# Altium footprint library Ethernet Modbus Dev PCB.PcbLib: 34 footprints (part 1 of 3)
Each footprint in its own frame and in the unit in brackets; x right, y up, seen from the top. Pads: shape width x height; smd on the part's side, far side on the other; paste and mask are expansions set on the pad; w line width, h text height; cw(c..) or ccw(c..) is an arc to the next point about the centre after c.
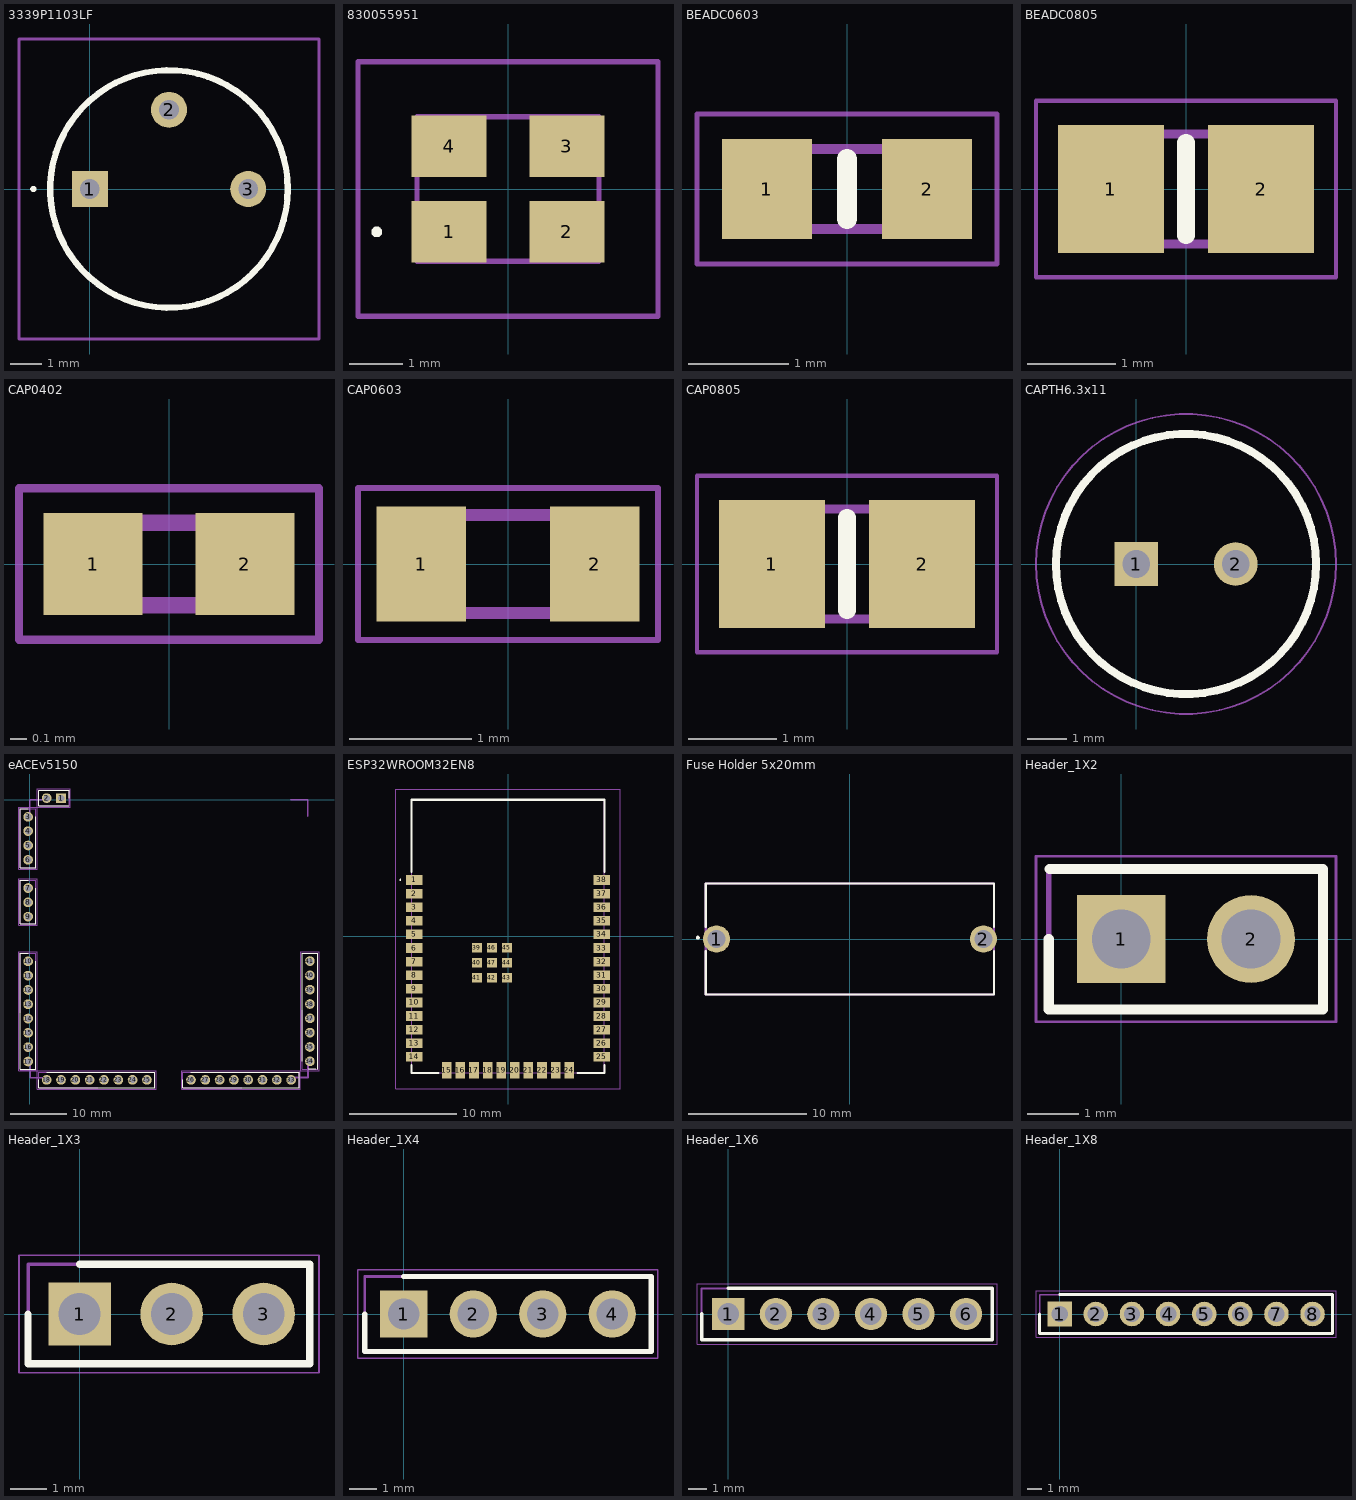
[diagram p0: the footprints below, top view; thin cyan lines are the x and y axes]

## 3339P1103LF [mm]
pads (3):
  rect 1.155x1.155 hole 0.63: 1(0,0)
  round 1.155 hole 0.63: 2(2.54,2.54) 3(5.08,0)
Top Overlay:
  circle w0.2: c2.54,0 r3.81
  lines w0.1: -1.86,0 ccw(c-1.81,0) -1.76,0 ccw(c-1.81,0) -1.86,0
Mechanical 13:
  circle w0.1: c2.54,0 r3.81
Mechanical 15:
  lines w0.1: -2.27,-4.81 7.35,-4.81 7.35,4.81 -2.27,4.81 -2.27,-4.81
3D body "3339P-1-103LF.stp": height 6.42, standoff -4.69, extent -1.27,-3.81 6.35,3.81

## 830055951 [mm]
pads (4):
  rect 1.4x1.15 smd: 1(-1.1,-0.8) 2(1.1,-0.8) 3(1.1,0.8) 4(-1.1,0.8)
Top Overlay:
  lines w0.1: -2.5,-0.8 ccw(c-2.45,-0.8) -2.4,-0.8 ccw(c-2.45,-0.8) -2.5,-0.8
Mechanical 13:
  lines w0.1: -1.7,-1.35 -1.7,1.35 1.7,1.35 1.7,-1.35 -1.7,-1.35
Mechanical 15:
  lines w0.1: -2.8,-2.375 -2.8,2.375 2.8,2.375 2.8,-2.375 -2.8,-2.375
3D body "830055951.stp": height 0.9, standoff 0, extent -1.7,-1.35 1.7,1.35

## BEADC0603 [mm]
pads (2):
  rect 0.9x1 smd: 1(-0.8,0) 2(0.8,0)
Top Overlay:
  lines w0.2: 0,-0.3 0,0.3
Mechanical 13:
  lines w0.1: -0.8,-0.4 -0.8,0.4 0.8,0.4 0.8,-0.4 -0.8,-0.4
Mechanical 15:
  lines w0.05: -1.5,-0.75 -1.5,0.75 1.5,0.75 1.5,-0.75 -1.5,-0.75
3D body "MMZ1608Y152BTD25.stp": height 0.95, standoff 0, extent -0.8,-0.4 0.8,0.4

## BEADC0805 [mm]
pads (2):
  rect 1.2x1.45 smd: 1(-0.85,0) 2(0.85,0)
Top Overlay:
  lines w0.2: 0,-0.525 0,0.525
Mechanical 13:
  lines w0.1: -1,-0.625 -1,0.625 1,0.625 1,-0.625 -1,-0.625
Mechanical 15:
  lines w0.05: -1.7,-1 -1.7,1 1.7,1 1.7,-1 -1.7,-1
3D body "ILHB0805ER601V.stp": height 1.1, standoff 0, extent -1,-0.625 1,0.625

## CAP0402 [mm]
pads (2):
  rect 0.6x0.62 smd: 1(-0.46,0) 2(0.46,0)
Mechanical 13:
  lines w0.1: -0.5,-0.25 -0.5,0.25 0.5,0.25 0.5,-0.25 -0.5,-0.25
Mechanical 15:
  lines w0.05: -0.91,-0.46 -0.91,0.46 0.91,0.46 0.91,-0.46 -0.91,-0.46
3D body "GRM1555C1H151JA01D.stp": height 0.55, standoff 0, extent -0.5,-0.25 0.5,0.25

## CAP0603 [mm]
pads (2):
  rect 0.73x0.94 smd: 1(-0.71,0) 2(0.71,0)
Mechanical 13:
  lines w0.1: -0.8,-0.4 -0.8,0.4 0.8,0.4 0.8,-0.4 -0.8,-0.4
Mechanical 15:
  lines w0.05: -1.225,-0.62 -1.225,0.62 1.225,0.62 1.225,-0.62 -1.225,-0.62
3D body "CL10B104KB8NNWC.stp": height 0.9, standoff 0, extent -0.8,-0.4 0.8,0.4

## CAP0805 [mm]
pads (2):
  rect 1.2x1.45 smd: 1(-0.85,0) 2(0.85,0)
Top Overlay:
  lines w0.2: 0,-0.525 0,0.525
Mechanical 13:
  lines w0.1: -1,-0.625 1,-0.625 1,0.625 -1,0.625 -1,-0.625
Mechanical 15:
  lines w0.05: -1.7,-1 1.7,-1 1.7,1 -1.7,1 -1.7,-1
3D body "HZ0805D102R-10.stp": height 1.1, standoff 0, extent -1,-0.625 1,0.625

## CAPTH6.3x11 [mm]
pads (2):
  rect 1.1x1.1 hole 0.7: 1(0,0)
  round 1.1 hole 0.7: 2(2.5,0)
Top Overlay:
  circle w0.2: c1.25,0 r3.275
Mechanical 13:
  circle w0.1: c1.25,0 r3.275
Mechanical 15:
  circle w0.05: c1.25,0 r3.775
3D body "450PK1MEFC6.3X11.stp": height 13, standoff -10, extent -2.138,-3.397 4.65,3.397

## eACEv5150 [mm]
pads (41):
  rect 1.725x1.725 hole 1.15: 1(5.54,0.3)
  round 1.725 hole 1.15: 2(3,0.3) 3(-0.3,-3.02) 4(-0.3,-5.56) 5(-0.3,-8.1) 6(-0.3,-10.64) 7(-0.3,-15.66) 8(-0.3,-18.2) 9(-0.3,-20.74) 10(-0.3,-28.66) 11(-0.3,-31.2) 12(-0.3,-33.74) 13(-0.3,-36.28) 14(-0.3,-38.82) 15(-0.3,-41.36) 16(-0.3,-43.9) 17(-0.3,-46.44) 18(3,-49.7) 19(5.54,-49.7) 20(8.08,-49.7) 21(10.62,-49.7) 22(13.16,-49.7) 23(15.7,-49.7) 24(18.24,-49.7) 25(20.78,-49.7) 26(28.6,-49.7) 27(31.14,-49.7) 28(33.68,-49.7) 29(36.22,-49.7) 30(38.76,-49.7) 31(41.3,-49.7) 32(43.84,-49.7) 33(46.38,-49.7) 34(49.7,-46.4) 35(49.7,-43.86) 36(49.7,-41.32) 37(49.7,-38.78) 38(49.7,-36.24) 39(49.7,-33.7) 40(49.7,-31.16) 41(49.7,-28.62)
Top Overlay:
  lines w0.2: -0.3,-27.24 -1.67,-27.24 -1.67,-47.837 1.07,-47.837 1.07,-28.66 ; -0.3,-14.24 -1.67,-14.24 -1.67,-22.01 1.07,-22.01 1.07,-15.66 ; -0.3,-1.6 -1.67,-1.6 -1.67,-12.06 1.07,-12.06 1.07,-3.02 ; 1.58,-49.7 1.58,-51.07 22.177,-51.07 22.177,-48.33 3,-48.33 ; 1.59,1.65 1.59,-1.07 6.94,-1.07 ; 1.59,1.68 6.96,1.68 ; 6.96,0.3 6.96,1.67 ; 27.18,-49.7 27.18,-51.07 47.777,-51.07 47.777,-48.33 28.6,-48.33 ; 48.33,-46.4 48.33,-27.223 51.07,-27.223 51.07,-47.82 ; 49.378,-47.75 50.748,-47.75
Mechanical 1:
  lines w0.3: 0,-2.972 0,-0.013 2.959,-0.013 ; 0.051,-46.38 0.051,-49.34 3.01,-49.34 ; 46.368,0.038 49.327,0.038 49.327,-2.921 ; 46.419,-49.289 49.378,-49.289 49.378,-46.33
Mechanical 13:
  lines w0.1: -1.67,-47.86 1.07,-47.86 ; -1.67,-37.7 -1.67,-27.24 1.07,-27.24 1.07,-37.7 ; 1.59,1.67 1.59,-1.07 6.96,-1.07 6.96,1.67 ; 12.04,-51.07 1.58,-51.07 1.58,-48.33 12.04,-48.33 ; 22.2,-51.07 22.2,-48.33 ; 37.64,-51.07 27.18,-51.07 27.18,-48.33 37.64,-48.33 ; 47.8,-51.07 47.8,-48.33 ; 48.33,-37.36 48.33,-47.82 51.07,-47.82 51.07,-37.36 ; 48.33,-27.2 51.07,-27.2 ; -1.67,-22.01 -1.67,-14.24 1.07,-14.24 1.07,-22.01 -1.67,-22.01 ; -1.67,-12.06 -1.67,-1.6 1.07,-1.6 1.07,-12.06 -1.67,-12.06
Mechanical 15:
  lines w0.05: 1.336,-1.32 1.336,1.92 ; 1.34,-1.32 7.21,-1.32 7.21,1.92 1.34,1.92 ; -1.92,-48.091 -1.92,-26.99 1.32,-26.99 1.32,-48.091 -1.92,-48.091 ; -1.92,-22.264 -1.92,-13.99 1.32,-13.99 1.32,-22.264 -1.92,-22.264 ; -1.92,-12.31 -1.92,-1.35 1.32,-1.35 1.32,-12.31 -1.92,-12.31 ; 1.33,-51.32 22.431,-51.32 22.431,-48.08 1.33,-48.08 1.33,-51.32 ; 26.93,-51.32 26.93,-48.08 48.031,-48.08 48.031,-51.32 26.93,-51.32 ; 48.08,-48.07 48.08,-26.969 51.32,-26.969 51.32,-48.07 48.08,-48.07
3D body: height 8.89, standoff 5.08, extent 0,-49.34 49.378,0.038

## ESP32WROOM32EN8 [mm]
pads (47):
  rect 1.5x0.9 smd: 1(-8.75,5.26) 2(-8.75,3.99) 3(-8.75,2.72) 4(-8.75,1.45) 5(-8.75,0.18) 6(-8.75,-1.09) 7(-8.75,-2.36) 8(-8.75,-3.63) 9(-8.75,-4.9) 10(-8.75,-6.17) 11(-8.75,-7.44) 12(-8.75,-8.71) 13(-8.75,-9.98) 14(-8.75,-11.25) 25(8.75,-11.25) 26(8.75,-9.98) 27(8.75,-8.71) 28(8.75,-7.44) 29(8.75,-6.17) 30(8.75,-4.9) 31(8.75,-3.63) 32(8.75,-2.36) 33(8.75,-1.09) 34(8.75,0.18) 35(8.75,1.45) 36(8.75,2.72) 37(8.75,3.99) 38(8.75,5.26)
  rect 0.9x1.5 smd: 15(-5.715,-12.5) 16(-4.445,-12.5) 17(-3.175,-12.5) 18(-1.905,-12.5) 19(-0.635,-12.5) 20(0.635,-12.5) 21(1.905,-12.5) 22(3.175,-12.5) 23(4.445,-12.5) 24(5.715,-12.5)
  rect 0.9x0.9 smd: 39(-2.9,-1.06) 40(-2.9,-2.46) 41(-2.9,-3.86) 42(-1.5,-3.86) 43(-0.1,-3.86) 44(-0.1,-2.46) 45(-0.1,-1.06) 46(-1.5,-1.06) 47(-1.5,-2.46)
Top Overlay:
  lines w0.1: -10.1,5.26 ccw(c-10.05,5.26) -10,5.26 ccw(c-10.05,5.26) -10.1,5.26
  lines w0.2: -9,-12 -9,-12.75 -6.5,-12.75 ; -9,6 -9,12.75 9,12.75 9,6 ; 6.5,-12.75 9,-12.75 9,-12
Mechanical 13:
  lines w0.1: -9,-12.75 9,-12.75 9,12.75 -9,12.75 -9,-12.75
Mechanical 15:
  lines w0.1: -10.5,-14.25 10.5,-14.25 10.5,13.75 -10.5,13.75 -10.5,-14.25
3D body "ESP32-WROOM-32E-N8.stp": height 3.13, standoff 0.02, extent -9,-12.75 9,12.75

## Fuse Holder 5x20mm [mm]
pads (2):
  round 2.3 hole 1.5: 1(-11.3,0) 2(11.3,0)
Top Overlay:
  circle w0.2: c-12.887,0.113 r0.066
  lines w0.2: -12.2,-1.023 -12.2,-4.7 12.2,-4.7 12.2,-1.023 ; -12.2,1.023 -12.2,4.7 12.2,4.7 12.2,1.023
Mechanical 13:
  lines w0.2: -12.2,-4.7 -12.2,4.7 12.2,4.7 12.2,-4.7 -12.2,-4.7
3D body "696108003002.stp": height 13.36, standoff -3.48, extent -12.2,-4.7 12.2,4.7

## Header_1X2 [mm]
pads (2):
  rect 1.725x1.725 hole 1.15: 1(0,0)
  round 1.725 hole 1.15: 2(2.54,0)
Top Overlay:
  lines w0.2: -1.42,-1.38 3.95,-1.38 ; -1.42,-1.37 -1.42,0 ; -1.4,1.37 3.95,1.37 3.95,-1.35
Mechanical 13:
  lines w0.1: -1.42,-1.37 -1.42,1.37 3.95,1.37 3.95,-1.37
Mechanical 15:
  lines w0.05: 4.2,-1.62 -1.67,-1.62 -1.67,1.62 4.2,1.62 ; 4.204,-1.62 4.204,1.62

## Header_1X3 [mm]
pads (3):
  rect 1.725x1.725 hole 1.15: 1(0,0)
  round 1.725 hole 1.15: 2(2.54,0) 3(5.08,0)
Top Overlay:
  lines w0.2: -1.42,0 -1.42,-1.37 6.35,-1.37 6.35,1.37 0,1.37
Mechanical 13:
  lines w0.1: -1.42,-1.37 -1.42,1.37 6.35,1.37 6.35,-1.37 -1.42,-1.37
Mechanical 15:
  lines w0.05: -1.67,-1.62 6.604,-1.62 6.604,1.62 -1.67,1.62 -1.67,-1.62

## Header_1X4 [mm]
pads (4):
  rect 1.725x1.725 hole 1.15: 1(0,0)
  round 1.725 hole 1.15: 2(2.54,0) 3(5.08,0) 4(7.62,0)
Top Overlay:
  lines w0.2: -1.42,0 -1.42,-1.37 9.04,-1.37 9.04,1.37 0,1.37
Mechanical 13:
  lines w0.1: -1.42,-1.37 9.04,-1.37 9.04,1.37 -1.42,1.37 -1.42,-1.37
Mechanical 15:
  lines w0.05: -1.67,-1.62 9.29,-1.62 9.29,1.62 -1.67,1.62 -1.67,-1.62

## Header_1X6 [mm]
pads (6):
  rect 1.725x1.725 hole 1.15: 1(0,0)
  round 1.725 hole 1.15: 2(2.54,0) 3(5.08,0) 4(7.62,0) 5(10.16,0) 6(12.7,0)
Top Overlay:
  lines w0.2: -1.42,0 -1.42,-1.37 14.097,-1.37 14.097,1.37 0,1.37
Mechanical 13:
  lines w0.1: 9.04,-1.37 -1.42,-1.37 -1.42,1.37 9.04,1.37 ; 14.12,-1.37 14.12,1.37
Mechanical 15:
  lines w0.05: -1.67,-1.62 14.351,-1.62 14.351,1.62 -1.67,1.62 -1.67,-1.62

## Header_1X8 [mm]
pads (8):
  rect 1.725x1.725 hole 1.15: 1(0,0)
  round 1.725 hole 1.15: 2(2.54,0) 3(5.08,0) 4(7.62,0) 5(10.16,0) 6(12.7,0) 7(15.24,0) 8(17.78,0)
Top Overlay:
  lines w0.2: -1.42,0 -1.42,-1.37 19.177,-1.37 19.177,1.37 0,1.37
Mechanical 13:
  lines w0.1: 9.04,-1.37 -1.42,-1.37 -1.42,1.37 9.04,1.37 ; 19.2,-1.37 19.2,1.37
Mechanical 15:
  lines w0.05: -1.67,-1.62 -1.67,1.62 19.431,1.62 19.431,-1.62 -1.67,-1.62